# Altium schematic symbol library Capacitor.SchLib: 166 symbols
Pins are listed as number, name and electrical type; pins without a type are passive.

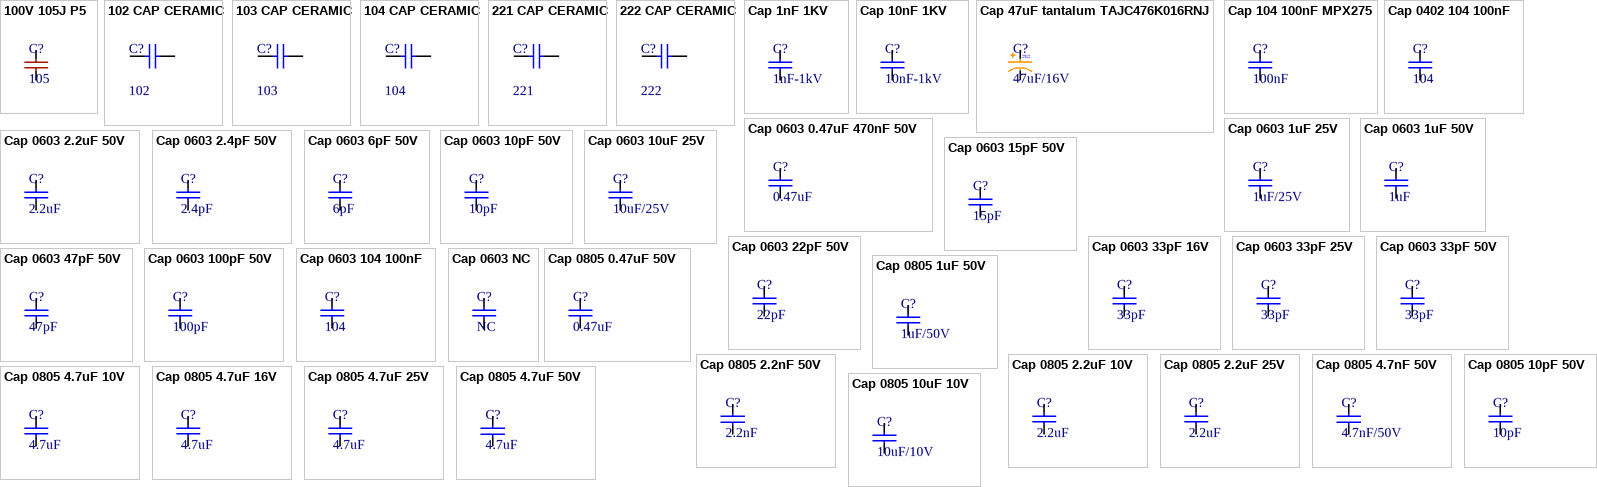
[diagram p0: symbols 100V 105J P5 to Cap 0805 10uF 10V]

## 100V 105J P5
designator C?, comment 105
105J 100V 1uF P5mm; Code: 1418-079
footprint CBB 100V 104J P5 (5mm)
footprint CBB P10 (10mm)
footprint CBB P7.5 (7.5mm)
pins: 1, 2

## 102 CAP CERAMIC
designator C?, comment 102
CAP CERAMIC 102 - 1nF; Code: 1416-022
footprint CAP_CERAMIC d2.54 (Tu gom mini)
footprint CAP_CERAMIC d3.81
pins: 1, 2

## 103 CAP CERAMIC
designator C?, comment 103
CAP CERAMIC 103 - 10nF; Code: 1416-023
footprint CAP_CERAMIC d2.54 (Tu gom mini)
footprint CAP_CERAMIC d3.81
pins: 1, 2

## 104 CAP CERAMIC
designator C?, comment 104
Cap CAP CERAMIC 104 - 100nF; Code: 1416-029
footprint CAP_CERAMIC d2.54 (Tu gom mini)
footprint CAP_CERAMIC d3.81
pins: 1, 2

## 221 CAP CERAMIC
designator C?, comment 221
221, 2.2pF 50V, ±10%; Code: 1416-018
footprint CAP_CERAMIC d2.54 (Tu gom mini)
footprint CAP_CERAMIC d3.81
pins: 1, 2

## 222 CAP CERAMIC
designator C?, comment 222
222, 22pF 50V, ±10%; Code: 1416-010
footprint CAP_CERAMIC d2.54 (Tu gom mini)
footprint CAP_CERAMIC d3.81
pins: 1, 2

## Cap 1nF 1KV
designator C?, comment 1nF-1kV
102 1KV High Voltage Ceramic Disk Capacitor; Code: N/A
footprint CAP_CERAMIC d5.08
pins: 1, 2

## Cap 10nF 1KV
designator C?, comment 10nF-1kV
103 1KV High Voltage Ceramic Disk Capacitor; Code: 1416-047
footprint CAP_CERAMIC d5.08
pins: 1, 2

## Cap 47uF tantalum TAJC476K016RNJ
designator C?, comment 47uF/16V
Cap SMD 2312 (6032); Code: N/A; Value: 47uF/16V
footprint C_tantalum_6032-2312 (CAPACITOR, TAN C, TAN F, TAN U, TAN L, 6032P, 6.0X3.2mm)
pins: 1, 2
text: 2312

## Cap 104 100nF MPX275
designator C?, comment 100nF
Cap 104 100nF 275V MPX275V X2, P = 10mm; Designed by: Nhox; Code: N/A
footprint MPX 275V (13x12x6mm)
pins: 1, 2

## Cap 0402 104 100nF
designator C?, comment 104
Cap SMD 0402 104-100nF-0.1uF 50V; Code: 1454-080
footprint C_0402_SMD
pins: 1, 2

## Cap 0603 0.47uF 470nF 50V
designator C?, comment 0.47uF
Cap SMD 0603; Code: 1451-087
footprint C_0603_SMD
pins: 1, 2

## Cap 0603 1uF 25V
designator C?, comment 1uF/25V
Cap SMD 0603 105 - 1uF 25V; Code: 1450-092
footprint C_0603_SMD
pins: 1, 2

## Cap 0603 1uF 50V
designator C?, comment 1uF
Cap SMD 0603; Code: 1451-092
footprint C_0603_SMD
pins: 1, 2

## Cap 0603 2.2uF 50V
designator C?, comment 2.2uF
Cap SMD 0603; Code: 1451-094
footprint C_0603_SMD
pins: 1, 2

## Cap 0603 2.4pF 50V
designator C?, comment 2.4pF
Cap SMD 0603 2.4pF 50V; Designed by: Nhox; Code: N/A
footprint C_0603_SMD
pins: 1, 2

## Cap 0603 6pF 50V
designator C?, comment 6pF
Cap SMD 0603 6pF 50V; Designed by: Nhox; Code: N/A
footprint C_0603_SMD
pins: 1, 2

## Cap 0603 10pF 50V
designator C?, comment 10pF
Cap SMD 0603; Code: 1451-018
footprint C_0603_SMD
pins: 1, 2

## Cap 0603 10uF 25V
designator C?, comment 10uF/25V
Cap SMD 0603 106-10uF 25V; Code: 1450-100
footprint C_0603_SMD
pins: 1, 2

## Cap 0603 15pF 50V
designator C?, comment 15pF
Cap SMD 0603 15pF 50V; Code: 1451-022
footprint C_0603_SMD
pins: 1, 2

## Cap 0603 22pF 50V
designator C?, comment 22pF
Cap SMD 0603; Code: 1451-024
footprint C_0603_SMD
pins: 1, 2

## Cap 0603 33pF 16V
designator C?, comment 33pF
Cap SMD 0603; Code: 1449-030
footprint C_0603_SMD
pins: 1, 2

## Cap 0603 33pF 25V
designator C?, comment 33pF
Cap SMD 0603; Code: 1450-030
footprint C_0603_SMD
pins: 1, 2

## Cap 0603 33pF 50V
designator C?, comment 33pF
Cap SMD 0603; Code: 1451-030
footprint C_0603_SMD
pins: 1, 2

## Cap 0603 47pF 50V
designator C?, comment 47pF
Cap SMD 0603; Code: 1451-034
footprint C_0603_SMD
pins: 1, 2

## Cap 0603 100pF 50V
designator C?, comment 100pF
Cap SMD 0603; Code: N/A
footprint C_0603_SMD
pins: 1, 2

## Cap 0603 104 100nF
designator C?, comment 104
Cap SMD 0603 104-100nF-0.1uF 50V; Code: 1451-080
footprint C_0603_SMD
pins: 1, 2

## Cap 0603 NC
designator C?, comment NC  (no BOM)
Cap SMD 0603 NC; Code: N/A
footprint C_0603_SMD
pins: 1, 2

## Cap 0805 0.47uF 50V
designator C?, comment 0.47uF
Cap SMD 0805 0.47uF/50V, 470nF/50V, 474; Code: N/A
footprint C_0805_SMD
pins: 1, 2

## Cap 0805 1uF 50V
designator C?, comment 1uF/50V
Cap SMD 0805 105 - 1uF 50V; Code: 1438-092
footprint C_0805_SMD
pins: 1, 2

## Cap 0805 2.2nF 50V
designator C?, comment 2.2nF
Tu 2.2nF 50V, SMD 0805; Code: 1438-062
footprint C_0805_SMD
pins: 1, 2

## Cap 0805 2.2uF 10V
designator C?, comment 2.2uF
Cap SMD 0805 225 - 2.2uF 10V; Code: 1434-094
footprint C_0805_SMD
pins: 1, 2

## Cap 0805 2.2uF 25V
designator C?, comment 2.2uF
Cap SMD 0805 2.2uF/25V; Code: 1436-094
footprint C_0805_SMD
pins: 1, 2

## Cap 0805 4.7nF 50V
designator C?, comment 4.7nF/50V
Capacitor SMD 0805; Code: 1438-065; Designed by: TranLuyen
footprint C_0805_SMD
pins: 1, 2

## Cap 0805 4.7uF 10V
designator C?, comment 4.7uF
Cap SMD 0805 475 - 4.7uF 10V; Code: 1434-097
footprint C_0805_SMD
pins: 1, 2

## Cap 0805 4.7uF 16V
designator C?, comment 4.7uF
Cap SMD 0805 4.7uF/16V; Code: 1435-097
footprint C_0805_SMD
pins: 1, 2

## Cap 0805 4.7uF 25V
designator C?, comment 4.7uF
Cap SMD 0805 475 - 4.7uF 25V; Code: 1434-097
footprint C_0805_SMD
pins: 1, 2

## Cap 0805 4.7uF 50V
designator C?, comment 4.7uF
Capacitor SMD 0805; Code: 1438-097; Designed by: TranLuyen
footprint C_0805_SMD
pins: 1, 2

## Cap 0805 10pF 50V
designator C?, comment 10pF
Cap SMD 0805; Code: 1438-018
footprint C_0805_SMD
pins: 1, 2

## Cap 0805 10uF 10V
designator C?, comment 10uF/10V
Tu Dan 10uF 10V, SMD 0805; Code: 1434-100; Designed by: nhox
footprint C_0805_SMD
pins: 1, 2

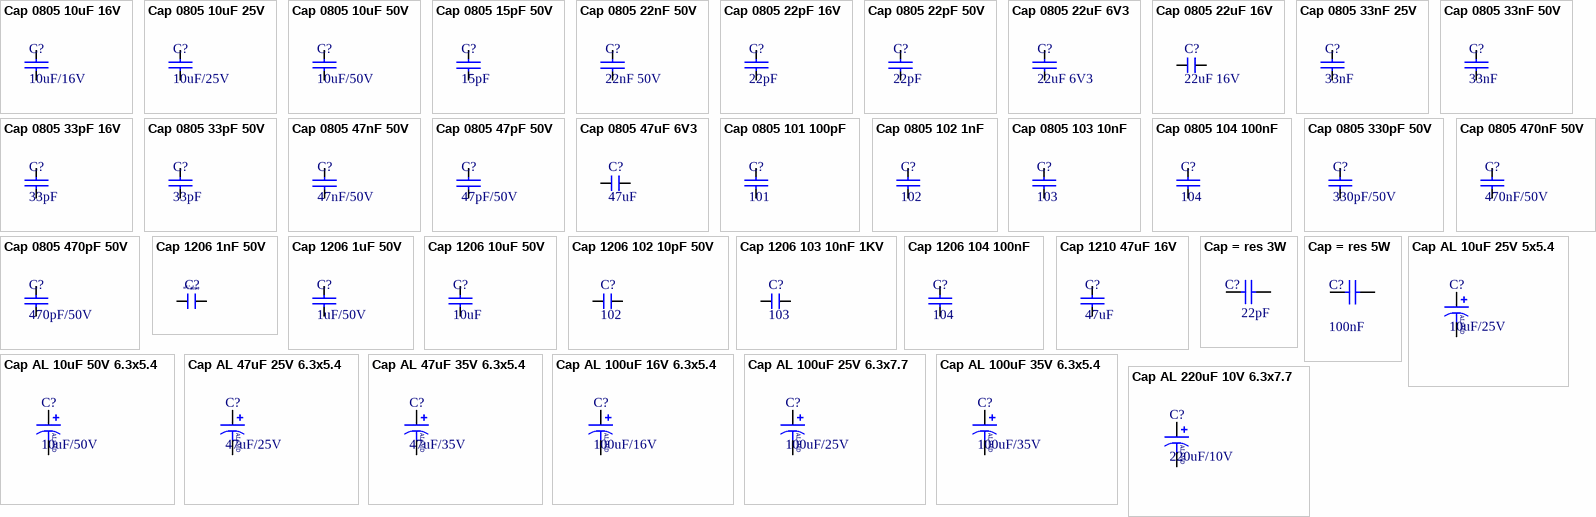
[diagram p1: symbols Cap 0805 10uF 16V to Cap AL 220uF 10V 6.3x7.7]

## Cap 0805 10uF 16V
designator C?, comment 10uF/16V
Cap SMD 0805 10uF 16V; Code: 1435-100
footprint C_0805_SMD
pins: 1, 2

## Cap 0805 10uF 25V
designator C?, comment 10uF/25V
Cap SMD 0805 10uF; Code: 1436-100
footprint C_0805_SMD
pins: 1, 2

## Cap 0805 10uF 50V
designator C?, comment 10uF/50V
Cap SMD 0805 10uF 50V; Code: 1438-100
footprint C_0805_SMD
pins: 1, 2

## Cap 0805 15pF 50V
designator C?, comment 15pF
Capacitor SMD 0805; Code: 1438-022; Designed by: TranLuyen
footprint C_0805_SMD
pins: 1, 2

## Cap 0805 22nF 50V
designator C?, comment 22nF 50V
Capacitor SMD 0805; Code: 1438-073
footprint C_0805_SMD
pins: 1, 2

## Cap 0805 22pF 16V
designator C?, comment 22pF
Cap SMD 0805; Code: 1435-024; Designed by: TranLuyen
footprint C_0805_SMD
pins: 1, 2

## Cap 0805 22pF 50V
designator C?, comment 22pF
Tu 22pF 50V, SMD 0805; Code: 1438-024; Designed by: nhox
footprint C_0805_SMD
pins: 1, 2

## Cap 0805 22uF 6V3
designator C?, comment 22uF 6V3
Tu Dan 22uF 6V3, SMD 0805; Code: 1431-208
footprint C_0805_SMD
pins: 1, 2

## Cap 0805 22uF 16V
designator C?, comment 22uF 16V
Tu Dan 22uF 16V, SMD 0805; Code: 1431-213; Designed by: Nhox
footprint C_0805_SMD
pins: 1, 2

## Cap 0805 33nF 25V
designator C?, comment 33nF
Cap SMD 0805 33nF/25V; Code: 1436-075
footprint C_0805_SMD
pins: 1, 2

## Cap 0805 33nF 50V
designator C?, comment 33nF
Cap SMD 0805; Code: 1438-075
footprint C_0805_SMD
pins: 1, 2

## Cap 0805 33pF 16V
designator C?, comment 33pF
Cap SMD 0805; Code: 1435-030; Designed by: Nhox
footprint C_0805_SMD
pins: 1, 2

## Cap 0805 33pF 50V
designator C?, comment 33pF
Cap SMD 0805; Code: 1438-030; Designed by: Nhox
footprint C_0805_SMD
pins: 1, 2

## Cap 0805 47nF 50V
designator C?, comment 47nF/50V
Capacitor SMD 0805; Code: 1438-076; Designed by: TranLuyen
footprint C_0805_SMD
pins: 1, 2

## Cap 0805 47pF 50V
designator C?, comment 47pF/50V
Capacitor SMD 0805; Code: 1438-034; Designed by: TranLuyen
footprint C_0805_SMD
pins: 1, 2

## Cap 0805 47uF 6V3
designator C?, comment 47uF
Tu Dan 47uF 6V3, SMD 0805; Code: 1431-200
footprint C_0805_SMD
pins: 1, 2

## Cap 0805 101 100pF
designator C?, comment 101
Cap SMD 0805 101-100pF 50V; Code: 1438-043
footprint C_0805_SMD
pins: 1, 2

## Cap 0805 102 1nF
designator C?, comment 102
Cap SMD 0805 102-1nF 50V; Code: 1438-060
footprint C_0805_SMD
pins: 1, 2

## Cap 0805 103 10nF
designator C?, comment 103
Cap SMD 0805 103-10nF 50V; Code: 1438-069
footprint C_0805_SMD
pins: 1, 2

## Cap 0805 104 100nF
designator C?, comment 104
Cap SMD 0805 104-100nF-0.1uF 50V; Code: 1438-080
footprint C_0805_SMD
pins: 1, 2

## Cap 0805 330pF 50V
designator C?, comment 330pF/50V
Cap SMD 0805  330pF 50V
footprint C_0805_SMD
pins: 1, 2

## Cap 0805 470nF 50V
designator C?, comment 470nF/50V
Cap SMD 0805  470nF 50V; Code: 1438-087
footprint C_0805_SMD
pins: 1, 2

## Cap 0805 470pF 50V
designator C?, comment 470pF/50V
Cap SMD 0805  470pF 50V; Code: 1438-056
footprint C_0805_SMD
pins: 1, 2

## Cap 1206 1nF 50V
designator C?, comment 1nF/50V  (value not drawn)
Cap SMD 1206; Code: 1447-060; Designed by: nhox
footprint C1206 (CHIP Capacitor, 3.2X1.6mm, 1206)
pins: 1, 2

## Cap 1206 1uF 50V
designator C?, comment 1uF/50V
Cap SMD 1206; Code: 1447-092
footprint C1206 (CHIP Capacitor, 3.2X1.6mm, 1206)
pins: 1, 2

## Cap 1206 10uF 50V
designator C?, comment 10uF
Cap SMD 1206 105-10uF 50V; Code: N/A
footprint C1206 (CHIP Capacitor, 3.2X1.6mm, 1206)
pins: 1, 2

## Cap 1206 102 10pF 50V
designator C?, comment 102
Tu 10pF 50V, SMD 1206; Code: 1447-018; Designed by: Nhox
footprint C1206 (CHIP Capacitor, 3.2X1.6mm, 1206)
pins: 1, 2

## Cap 1206 103 10nF 1KV
designator C?, comment 103
Tu 10nF 1KV, SMD 1206; Code: 1429-103; Designed by: Nhox
footprint C1206 (CHIP Capacitor, 3.2X1.6mm, 1206)
pins: 1, 2

## Cap 1206 104 100nF
designator C?, comment 104
Cap SMD 1206 104-100nF-0.1uF 50V; Code: 1447-080
footprint C1206 (CHIP Capacitor, 3.2X1.6mm, 1206)
pins: 1, 2

## Cap 1210 47uF 16V
designator C?, comment 47uF
Cap SMD 1210 (3215M); Designed by: TranLuyen; Code: N/A
footprint C1210 (CHIP Capacitor, 3.2X2.5mm, 1210, 3225)
pins: 1, 2

## Cap = res 3W
designator C?, comment value 22pF  (hidden comment: Capacitor Ceramic)
Capacitor; Published: 8-Jun-2000; LatestRevisionDate: 17-Jul-2002; LatestRevisionNote: Re-released for DXP Platform.; PackageReference: RAD-0.3; Publisher: Altium Limited
footprint Cap = res 3W (R2W, 2 pin, 700mil)
pins: 1, 2

## Cap = res 5W
designator C?, comment 100nF
Capacitor
footprint Cap res 5W (Tu loc 220)
pins: 1, 2

## Cap AL 10uF 25V 5x5.4
designator C?, comment 10uF/25V
Aluminum Capacitor 35V; Designed by: TranLuyen; Code: 1457-216
footprint C_EL_5 (Electrolytic Cap, D: 5.0mm, L: 5.8mm, Size C)
pins: 1, 2
1 alternate drawing of the same symbol
text: ALSMD

## Cap AL 10uF 50V 6.3x5.4
designator C?, comment 10uF/50V
Aluminum Capacitor SMD; Code: 1458-216; Designed by: TranLuyen
footprint C_EL_6_6 (Electrolytic Cap, D: 6.3mm L: 5.8mm, Size D)
pins: 1, 2
1 alternate drawing of the same symbol
text: ALSMD

## Cap AL 47uF 25V 6.3x5.4
designator C?, comment 47uF/25V
Aluminum Capacitor SMD 47uF 25V 6.3x5.4mm; Designed by: TranLuyen; Code: 1457-219
footprint C_EL_6_6 (Electrolytic Cap, D: 6.3mm L: 5.8mm, Size D)
pins: 1, 2
1 alternate drawing of the same symbol
text: ALSMD

## Cap AL 47uF 35V 6.3x5.4
designator C?, comment 47uF/35V
Aluminum Capacitor 35V; Code: 1458-103; Designed by: TranLuyen
footprint C_EL_6_6 (Electrolytic Cap, D: 6.3mm L: 5.8mm, Size D)
pins: 1, 2
1 alternate drawing of the same symbol
text: ALSMD

## Cap AL 100uF 16V 6.3x5.4
designator C?, comment 100uF/16V
Aluminum Capacitor D6.3 L5.4; Designed by: TranLuyen; Code: 1457-106
footprint C_EL_6_6 (Electrolytic Cap, D: 6.3mm L: 5.8mm, Size D)
pins: 1, 2
1 alternate drawing of the same symbol
text: ALSMD

## Cap AL 100uF 25V 6.3x7.7
designator C?, comment 100uF/25V
Aluminum Capacitor D6.3 L7.7; Designed by: TranLuyen; Code: 1457-222
footprint C_EL_6_6 (Electrolytic Cap, D: 6.3mm L: 5.8mm, Size D)
pins: 1, 2
1 alternate drawing of the same symbol
text: ALSMD

## Cap AL 100uF 35V 6.3x5.4
designator C?, comment 100uF/35V
Aluminum Capacitor 35V; Code: 1458-106; Designed by: TranLuyen
footprint C_EL_6_6 (Electrolytic Cap, D: 6.3mm L: 5.8mm, Size D)
footprint C_EL_8 (Electrolytic Cap, Size E, Size F, 8.3X10)
pins: 1, 2
1 alternate drawing of the same symbol
text: ALSMD

## Cap AL 220uF 10V 6.3x7.7
designator C?, comment 220uF/10V
Aluminum Capacitor D6.3 L7.7
footprint C_EL_6_6 (Electrolytic Cap, D: 6.3mm L: 5.8mm, Size D)
pins: 1, 2
1 alternate drawing of the same symbol
text: ALSMD

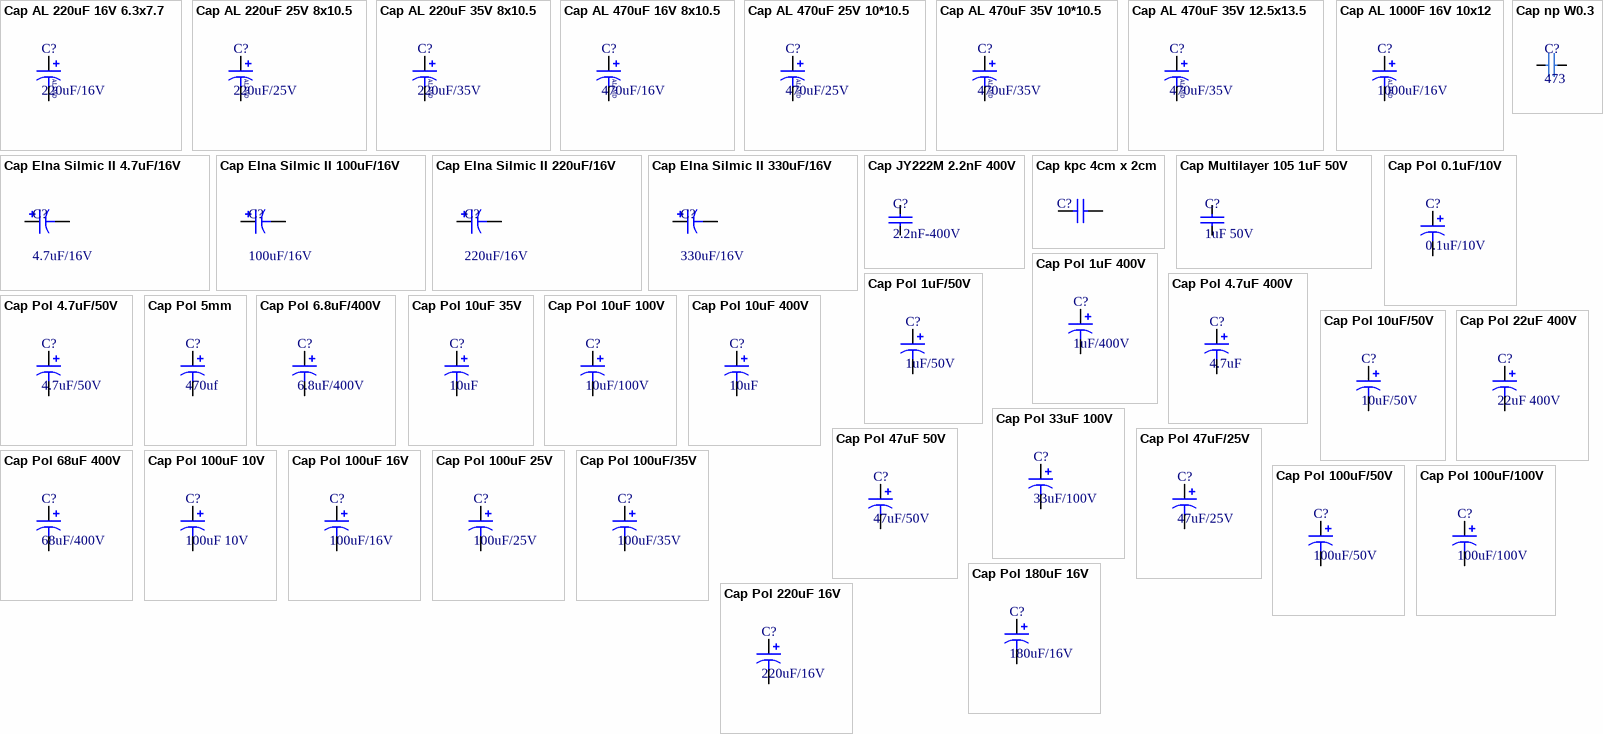
[diagram p2: symbols Cap AL 220uF 16V 6.3x7.7 to Cap Pol 220uF 16V]

## Cap AL 220uF 16V 6.3x7.7
designator C?, comment 220uF/16V
Aluminum Capacitor D6.3 L7.7; Designed by: TranLuyen; Code: 1457-109
footprint C_EL_6_6 (Electrolytic Cap, D: 6.3mm L: 5.8mm, Size D)
pins: 1, 2
1 alternate drawing of the same symbol
text: ALSMD

## Cap AL 220uF 25V 8x10.5
designator C?, comment 220uF/25V
Aluminum Capacitor 220uF 25V; Code: 1457-225
footprint C_EL_8 (Electrolytic Cap, Size E, Size F, 8.3X10)
pins: 1, 2
1 alternate drawing of the same symbol
text: ALSMD

## Cap AL 220uF 35V 8x10.5
designator C?, comment 220uF/35V
Aluminum Capacitor D8*L10.5; Code: 1458-109
footprint C_EL_8 (Electrolytic Cap, Size E, Size F, 8.3X10)
pins: 1, 2
1 alternate drawing of the same symbol
text: ALSMD

## Cap AL 470uF 16V 8x10.5
designator C?, comment 470uF/16V
Aluminum Capacitor 470uF D8 L10.5; Code: 1457-112
footprint C_EL_8 (Electrolytic Cap, Size E, Size F, 8.3X10)
pins: 1, 2
1 alternate drawing of the same symbol
text: ALSMD

## Cap AL 470uF 25V 10*10.5
designator C?, comment 470uF/25V
Aluminum Capacitor 470uF D10 L10.5; Code: 1457-228
footprint C_EL_10_12 (Electrolytic Cap, 10.3mm, L: 12.4mm)
pins: 1, 2
1 alternate drawing of the same symbol
text: ALSMD

## Cap AL 470uF 35V 10*10.5
designator C?, comment 470uF/35V
Aluminum Capacitor 470uF D10 L10.5
footprint C_EL_10_12 (Electrolytic Cap, 10.3mm, L: 12.4mm)
pins: 1, 2
1 alternate drawing of the same symbol
text: ALSMD

## Cap AL 470uF 35V 12.5x13.5
designator C?, comment 470uF/35V
Aluminum Capacitor 470uF D12.5 L13.5- / UCZ1V471M; Code: 1458-112; Designed by: TranLuyen
footprint C_EL_12 (Electrolytic Cap, 12.5x13mm)
pins: 1, 2
1 alternate drawing of the same symbol
text: ALSMD

## Cap AL 1000F 16V 10x12
designator C?, comment 1000uF/16V
Aluminum Capacitor 1000uF D10 L12; Code: 1457-114; Designed by: TranLuyen
footprint C_EL_10_12 (Electrolytic Cap, 10.3mm, L: 12.4mm)
pins: 1, 2
1 alternate drawing of the same symbol
text: ALSMD

## Cap Elna Silmic II 4.7uF/16V
designator C?, comment 4.7uF/16V
Cap Elna Silmic II 4.7uF/16V audio; Code: N/A
footprint C_4X7 (Cap Elec, D4.0X7.0H pitch: 1.5mm)
pins: 1, 2
1 alternate drawing of the same symbol

## Cap Elna Silmic II 100uF/16V
designator C?, comment 100uF/16V
Cap Elna Silmic II 100uF/16V audio; Code: N/A
footprint C_8X12 (Cap Elec, D8.0X12.0H pitch: 3.5mm, RB.14/.26, RB.15/.32)
pins: 1, 2
1 alternate drawing of the same symbol

## Cap Elna Silmic II 220uF/16V
designator C?, comment 220uF/16V
Cap Elna Silmic II 220uF/16V audio; Code: N/A
footprint C_8X12 (Cap Elec, D8.0X12.0H pitch: 3.5mm, RB.14/.26, RB.15/.32)
pins: 1, 2
1 alternate drawing of the same symbol

## Cap Elna Silmic II 330uF/16V
designator C?, comment 330uF/16V
Cap Elna Silmic II 330uF/16V audio; Code: N/A
footprint C_10X20 (Cap Elec, D10.0X20.0H pitch: 5.0mm, RB.2/.4)
pins: 1, 2
1 alternate drawing of the same symbol

## Cap JY222M 2.2nF 400V
designator C?, comment 2.2nF-400V
2.2nF 400V High Voltage Ceramic Disk Capacitor; Code: 1416-048
footprint CAP_CERAMIC d5.08
pins: 1, 2

## Cap kpc 4cm x 2cm
designator C?, comment Capacitor Ceramic  (value not drawn)
Capacitor
footprint Cap kpc 4cm x 2cm (Cap)
pins: 1, 2

## Cap Multilayer 105 1uF 50V
designator C?, comment 1uF 50V
1uF ±10% 50V, code 105; Code: 1425-001; Designed by: Nhox
footprint CN2-T
pins: 1, 2

## Cap np W0.3
designator C?, comment 473
Cap np W0.3; Value: 0.047uF; Code: N/A
footprint CN3
pins: 1, 2

## Cap Pol 0.1uF/10V
designator C?, comment 0.1uF/10V
Polarized Capacitor (Axial); Code: 1401-199
footprint C3MM
pins: 1, 2
1 alternate drawing of the same symbol

## Cap Pol 1uF 400V
designator C?, comment 1uF/400V
Polarized Capacitor (Axial); Code: 1404-330
footprint C_6.3x12 (pitch 2.5mm)
pins: 1, 2
1 alternate drawing of the same symbol

## Cap Pol 1uF/50V
designator C?, comment 1uF/50V
Polarized Capacitor (Axial); Code: 1402-330; Value: 1uF/50V
footprint C3MM
pins: 1, 2
1 alternate drawing of the same symbol

## Cap Pol 4.7uF 400V
designator C?, comment 4.7uF
Polarized Capacitor (Axial); Code: 1404-335
footprint C_8X12 (Cap Elec, D8.0X12.0H pitch: 3.5mm, RB.14/.26, RB.15/.32)
pins: 1, 2
1 alternate drawing of the same symbol

## Cap Pol 4.7uF/50V
designator C?, comment 4.7uF/50V
Polarized Capacitor (Axial) 4.7uF/50V; Code: 1402-335
footprint C5mm
pins: 1, 2
1 alternate drawing of the same symbol

## Cap Pol 5mm
designator C?, comment 470uf
Polarized Capacitor (Axial)
footprint C5mm
footprint C5mm - NAM
pins: 1, 2
1 alternate drawing of the same symbol

## Cap Pol 6.8uF/400V
designator C?, comment 6.8uF/400V
Polarized Capacitor (Axial); Code: N/A
footprint C10mm
pins: 1, 2
1 alternate drawing of the same symbol

## Cap Pol 10uF 35V
designator C?, comment 10uF
Polarized Capacitor (Axial); Code: 1402-219
footprint C_8X12 (Cap Elec, D8.0X12.0H pitch: 3.5mm, RB.14/.26, RB.15/.32)
pins: 1, 2
1 alternate drawing of the same symbol

## Cap Pol 10uF 100V
designator C?, comment 10uF/100V
Polarized Capacitor (Axial); Code: 1403-219
footprint C_6.3x12 (pitch 2.5mm)
pins: 1, 2
1 alternate drawing of the same symbol

## Cap Pol 10uF 400V
designator C?, comment 10uF
Polarized Capacitor (Axial); Code: 1404-338
footprint C_10X16 (Cap Elec, D10.0X16.0H pitch: 5.0mm)
pins: 1, 2
1 alternate drawing of the same symbol

## Cap Pol 10uF/50V
designator C?, comment 10uF/50V
Polarized Capacitor (Axial) 10uF/50V; Code: 1402-338
footprint C5mm
pins: 1, 2
1 alternate drawing of the same symbol

## Cap Pol 22uF 400V
designator C?, comment 22uF 400V
Capacitor 22uF 400V DxL 12.5x20mm, Pin to Pin 5mm; Code: N/A
footprint CAP 5.0*12.5*20 - BK (½Å¾à5mmÖ±¾¶12.5mm¸ß¶È20mm)
pins: 1, 2
1 alternate drawing of the same symbol

## Cap Pol 33uF 100V
designator C?, comment 33uF/100V
Capacitor 33uF 100V, 8x12mm DIP; Code: 1403-221
footprint C8X12mm (Cap Elec, D8.0X12.0H pitch: 3.5mm, RB.14/.26, RB.15/.32)
footprint C_8x12_R (8x12)
pins: 1, 2
1 alternate drawing of the same symbol

## Cap Pol 47uF 50V
designator C?, comment 47uF/50V
Polarized Capacitor; Code: 1402-341
footprint C_6.3x15 (pitch 2.5mm)
pins: 1, 2
1 alternate drawing of the same symbol

## Cap Pol 47uF/25V
designator C?, comment 47uF/25V
Polarized Capacitor (Axial) 47uF 25V; Code: 1402-103
footprint C5mm
pins: 1, 2
1 alternate drawing of the same symbol

## Cap Pol 68uF 400V
designator C?, comment 68uF/400V
Capacitor pol; Code: 1404-343
footprint C_16x27 (7.5MM Lead Spacing)
pins: 1, 2
1 alternate drawing of the same symbol

## Cap Pol 100uF 10V
designator C?, comment 100uF 10V
Polarized Capacitor (Axial) 100uF 10V; Code: 1401-225
footprint C_6.3x7 (pitch 2.5mm)
pins: 1, 2
1 alternate drawing of the same symbol

## Cap Pol 100uF 16V
designator C?, comment 100uF/16V
Polarized Capacitor (Axial); Code: 1401-344
footprint C_6.3x12 (pitch 2.5mm)
pins: 1, 2
1 alternate drawing of the same symbol

## Cap Pol 100uF 25V
designator C?, comment 100uF/25V
Polarized Capacitor (Axial); Code: 1402-106
footprint C_6.3x12 (pitch 2.5mm)
pins: 1, 2
1 alternate drawing of the same symbol

## Cap Pol 100uF/35V
designator C?, comment 100uF/35V
Polarized Capacitor (Axial) 100uF 35V; Code: 1402-225
footprint C_6.3x12 (pitch 2.5mm)
pins: 1, 2
1 alternate drawing of the same symbol

## Cap Pol 100uF/50V
designator C?, comment 100uF/50V
Polarized Capacitor (Axial) 100uF 50V; Code: N/A
footprint C_8X12 (Cap Elec, D8.0X12.0H pitch: 3.5mm, RB.14/.26, RB.15/.32)
footprint C_8x12_R (8x12)
pins: 1, 2
1 alternate drawing of the same symbol

## Cap Pol 100uF/100V
designator C?, comment 100uF/100V
Polarized Capacitor (Axial) 100uF 100V; Code: 1403-225
footprint C_10X16 (Cap Elec, D10.0X16.0H pitch: 5.0mm)
pins: 1, 2
1 alternate drawing of the same symbol

## Cap Pol 180uF 16V
designator C?, comment 180uF/16V
Capacitor 180uF 10V, 5x8mm DIP; Code: N/A
footprint C5mm
pins: 1, 2
1 alternate drawing of the same symbol

## Cap Pol 220uF 16V
designator C?, comment 220uF/16V
Capacitor 220uF 16V; Code: 1401-347
footprint C_6.3x7 (pitch 2.5mm)
pins: 1, 2
1 alternate drawing of the same symbol

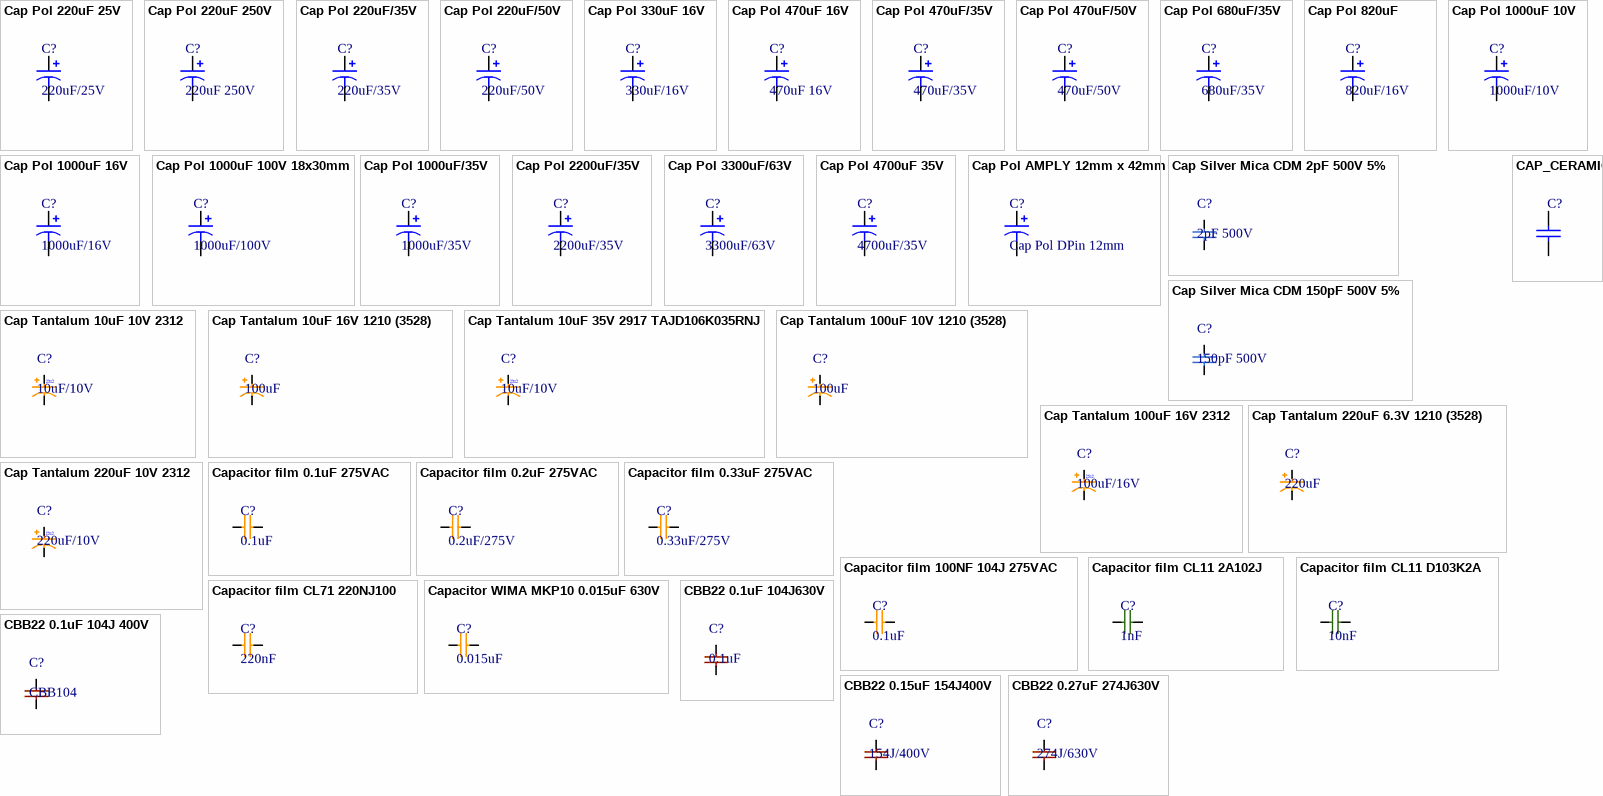
[diagram p3: symbols Cap Pol 220uF 25V to CBB22 0.27uF 274J630V]

## Cap Pol 220uF 25V
designator C?, comment 220uF/25V
Capacitor 220uF 25V; Code: 1402-109
footprint C8X12mm (Cap Elec, D8.0X12.0H pitch: 3.5mm, RB.14/.26, RB.15/.32)
pins: 1, 2
1 alternate drawing of the same symbol

## Cap Pol 220uF 250V
designator C?, comment 220uF 250V
Capacitor 220uF 250V DxL 18x35mm, Pin to Pin 7.5mm; Code: N/A
footprint CAP 7.5*18*35.5 - BK (Pin to Pin 7.5mm. DxL 18x35.5mm)
pins: 1, 2
1 alternate drawing of the same symbol

## Cap Pol 220uF/35V
designator C?, comment 220uF/35V
Polarized Capacitor (Axial) 220uF 35V; Code: 1402-228
footprint C5mm
footprint C8X12mm (Cap Elec, D8.0X12.0H pitch: 3.5mm, RB.14/.26, RB.15/.32)
pins: 1, 2
1 alternate drawing of the same symbol

## Cap Pol 220uF/50V
designator C?, comment 220uF/50V
Polarized Capacitor (Axial) 220uF 50V; Code: 1402-347
footprint C_10X16 (Cap Elec, D10.0X16.0H pitch: 5.0mm)
pins: 1, 2
1 alternate drawing of the same symbol

## Cap Pol 330uF 16V
designator C?, comment 330uF/16V
Capacitor 330uF 16; Code: 1401-349
footprint C8X12mm (Cap Elec, D8.0X12.0H pitch: 3.5mm, RB.14/.26, RB.15/.32)
pins: 1, 2
1 alternate drawing of the same symbol

## Cap Pol 470uF 16V
designator C?, comment 470uF 16V
Code: 1401-350
footprint C8X12mm (Cap Elec, D8.0X12.0H pitch: 3.5mm, RB.14/.26, RB.15/.32)
pins: 1, 2
1 alternate drawing of the same symbol

## Cap Pol 470uF/35V
designator C?, comment 470uF/35V
Polarized Capacitor (Axial) 470uF 35V; Code: 1402-231
footprint C10mm
footprint C8X12mm (Cap Elec, D8.0X12.0H pitch: 3.5mm, RB.14/.26, RB.15/.32)
pins: 1, 2
1 alternate drawing of the same symbol

## Cap Pol 470uF/50V
designator C?, comment 470uF/50V
CAP POL; Code: 1402-350
footprint C_10X20 (Cap Elec, D10.0X20.0H pitch: 5.0mm, RB.2/.4)
pins: 1, 2
1 alternate drawing of the same symbol

## Cap Pol 680uF/35V
designator C?, comment 680uF/35V
Polarized Capacitor (Axial) 680uF 35V; Code: 1402-232
footprint C10mm
footprint C8X12mm (Cap Elec, D8.0X12.0H pitch: 3.5mm, RB.14/.26, RB.15/.32)
pins: 1, 2
1 alternate drawing of the same symbol

## Cap Pol 820uF
designator C?, comment 820uF/16V
Capacitor 820uF 16V; Code: N/A
footprint C_10X16 (Cap Elec, D10.0X16.0H pitch: 5.0mm)
pins: 1, 2
1 alternate drawing of the same symbol

## Cap Pol 1000uF 10V
designator C?, comment 1000uF/10V
Capacitor 1000uF 10V, 8x12mm DIP; Code: N/A
footprint C8X12mm (Cap Elec, D8.0X12.0H pitch: 3.5mm, RB.14/.26, RB.15/.32)
footprint C_8x12_R (8x12)
pins: 1, 2
1 alternate drawing of the same symbol

## Cap Pol 1000uF 16V
designator C?, comment 1000uF/16V
Capacitor pol; Code: 1401-352
footprint C_8X12 (Cap Elec, D8.0X12.0H pitch: 3.5mm, RB.14/.26, RB.15/.32)
pins: 1, 2
1 alternate drawing of the same symbol

## Cap Pol 1000uF 100V 18x30mm
designator C?, comment 1000uF/100V
Polarized Capacitor (Axial) 1000uF/100V; Code: 1403-233
footprint C_18X35_2 (Cap Elec, D18X35H pitch: 7.6mm, 5mm, RB.3/.7)
pins: 1, 2
1 alternate drawing of the same symbol

## Cap Pol 1000uF/35V
designator C?, comment 1000uF/35V
Polarized Capacitor (Axial) 1000uF 35V; Code: 1402-233
footprint C_10X20 (Cap Elec, D10.0X20.0H pitch: 5.0mm, RB.2/.4)
footprint C_12.5x22 (5MM Lead Spacing)
pins: 1, 2
1 alternate drawing of the same symbol

## Cap Pol 2200uF/35V
designator C?, comment 2200uF/35V
Polarized Capacitor (Axial) 2200uF 35V; Code: 1402-234
footprint C_16x27 (7.5MM Lead Spacing)
pins: 1, 2
1 alternate drawing of the same symbol

## Cap Pol 3300uF/63V
designator C?, comment 3300uF/63V
Polarized Capacitor (Axial) 3300uF/63V; Code: 1403-116
footprint C_18X35 (Cap Elec, D18X35H pitch: 7.6mm, RB.3/.7)
pins: 1, 2
1 alternate drawing of the same symbol

## Cap Pol 4700uF 35V
designator C?, comment 4700uF/35V
Cap pol; Code: 1402-236
footprint C_18X35 (Cap Elec, D18X35H pitch: 7.6mm, RB.3/.7)
pins: 1, 2
1 alternate drawing of the same symbol

## Cap Pol AMPLY 12mm x 42mm
designator C?, comment Cap Pol DPin 12mm
Polarized Capacitor (Axial)
footprint Cap tu hoa amply (cap 12mm D42mm)
pins: 1, 2
1 alternate drawing of the same symbol

## Cap Silver Mica CDM 2pF 500V 5%
designator C?, comment 2pF 500V
2pF 500V 5% Cap Silver Mica CDM (5.9m); Code: N/A
footprint Silver Mica CDM 5.9mm
pins: 1, 2

## Cap Silver Mica CDM 150pF 500V 5%
designator C?, comment 150pF 500V
150pF 500V 5% Cap Silver Mica CDM (5.9m); Code: N/A
footprint Silver Mica CDM 5.9mm
pins: 1, 2

## Cap Tantalum 10uF 10V 2312
designator C?, comment 10uF/10V
Cap SMD 2312 (6032); Code: 1419-038; Value: 10uF/10V
footprint C_tantalum_6032-2312 (CAPACITOR, TAN C, TAN F, TAN U, TAN L, 6032P, 6.0X3.2mm)
pins: 1, 2
text: 2312

## Cap Tantalum 10uF 16V 1210 (3528)
designator C?, comment 100uF
Cap Tantalum SMD 1210 (3528)
footprint C_TANTALUM_3528_1210 (3.5 x 2.8 x 2.1mm)
pins: 1, 2

## Cap Tantalum 10uF 35V 2917 TAJD106K035RNJ
designator C?, comment 10uF/10V
Cap SMD 2312 (6032); Code: 1419-038; Value: 10uF/10V
footprint C_tantalum_2917_TAJD106K035RNJ (Conventional MnO2,10 uF,35 V)
pins: 1, 2
text: 2312

## Cap Tantalum 100uF 10V 1210 (3528)
designator C?, comment 100uF
Cap Tantalum SMD 1210 (3528); Code: 1419-039; Designed by: TranLuyen
footprint C_TANTALUM_3528_1210 (3.5 x 2.8 x 2.1mm)
pins: 1, 2

## Cap Tantalum 100uF 16V 2312
designator C?, comment 100uF/16V
Cap SMD 2312 (6032); Code: N/A
footprint C_tantalum_6032-2312 (CAPACITOR, TAN C, TAN F, TAN U, TAN L, 6032P, 6.0X3.2mm)
pins: 1, 2
text: 2312

## Cap Tantalum 220uF 6.3V 1210 (3528)
designator C?, comment 220uF
Cap Tantalum SMD 1210 (3528), 220uF, 6.3V; Designed by: Nhox; Code: N/A
footprint C_TANTALUM_3528_1210 (3.5 x 2.8 x 2.1mm)
pins: 1, 2

## Cap Tantalum 220uF 10V 2312
designator C?, comment 220uF/10V
Cap SMD 2312 (6032); Code: N/A
footprint C_tantalum_6032-2312 (CAPACITOR, TAN C, TAN F, TAN U, TAN L, 6032P, 6.0X3.2mm)
pins: 1, 2
text: 2312

## CAP_CERAMIC
designator C?, comment Capacitor Ceramic  (value not drawn)
102 103 104; Published: 8-Jun-2000; LatestRevisionDate: 17-Jul-2002; LatestRevisionNote: Re-released for DXP Platform.; PackageReference: RAD-0.3; Publisher: Altium Limited
footprint CAP_CERAMIC d2.54 (Tu gom mini)
footprint CAP_CERAMIC d3.81
footprint CAP_CERAMIC d5.08
pins: 1, 2

## Capacitor film 0.1uF 275VAC
designator C?, comment 0.1uF
Polyester Film Capacitor MPX series MPX104K275VAC 0.1uF 275V; Code: 1417-046; Designed by: Nhox
footprint C polyester film MPX104K275VAC 10mm/15mm (tu keo vang 0.1uF 275V)
pins: 1, 2

## Capacitor film 0.2uF 275VAC
designator C?, comment 0.2uF/275V
Polyester Film Capacitor MPX series MPX204K275VAC 0.2uF 275V; Designed by: TranLuyen; Code: N/A
footprint C polyester film MPX104K275VAC (tu keo vang 0.1uF 275V)
footprint C polyester film MPX104K275VAC 10mm/15mm (tu keo vang 0.1uF 275V)
pins: 1, 2

## Capacitor film 0.33uF 275VAC
designator C?, comment 0.33uF/275V
Polyester Film Capacitor MPX series MPX334K275VAC  0.33uF 275V; Designed by: TranLuyen; Code: N/A
footprint C polyester film MPX 0.33uF 275VAC (tu keo vang 0.33uF 275V)
footprint C polyester film MPX104K275VAC 10mm/15mm (tu keo vang 0.1uF 275V)
pins: 1, 2

## Capacitor film 100NF 104J 275VAC
designator C?, comment 0.1uF
Polyester Film Capacitor MPX series MPX104K275VAC 100nF 0.1uF 275V; Code: 1417-045; Designed by: TranLuyen
footprint C polyester film MPX104K275VAC (tu keo vang 0.1uF 275V)
footprint C polyester film MPX104K275VAC 10mm/15mm (tu keo vang 0.1uF 275V)
pins: 1, 2

## Capacitor film CL11 2A102J
designator C?, comment 1nF
CL11 Polyester Film capacitor-Inductive-PEI. 100V; Code: 1417-008; Designed by: TranLuyen
footprint C polyester film CL11 - 4mm (tu keo xanh)
pins: 1, 2

## Capacitor film CL11 D103K2A
designator C?, comment 10nF
CL11 Polyester Film capacitor-Inductive-PEI. 100V; Designed by: TranLuyen; Code: N/A
footprint C polyester film CL11 - 4mm (tu keo xanh)
pins: 1, 2

## Capacitor film CL71 220NJ100
designator C?, comment 220nF
224J 100V CL71 0.22uF 100V 10%, size: 7x2.5mm, polyester film; Code: 1417-039; Designed by: TranLuyen
footprint C polyester film CL71 - 5mm (tu keo vang)
pins: 1, 2

## Capacitor WIMA MKP10 0.015uF 630V
designator C?, comment 0.015uF
Capacitor WIMA MKP10 0.015uF 630V; Code: N/A
footprint C WIMA MKP10 0.015 630V (WIMA MKP10 0.015 630V)
pins: 1, 2

## CBB22 0.1uF 104J630V
designator C?, comment 0.1uF
CBB22 Polyester Capacitor; Designed by: TranLuyen; Code: N/A
footprint CBB22-20mm-10mm
pins: 1, 2

## CBB22 0.1uF 104J 400V
designator C?, comment CBB104
CBB22 Polyester Capacitor; Code: N/A
footprint CBB22-20mm-10mm
pins: 1, 2

## CBB22 0.15uF 154J400V
designator C?, comment 154J/400V
CBB22 Polyester Capacitor; Designed by: TranLuyen; Code: N/A
footprint CBB 10-15mm (15*18*11mm)
pins: 1, 2

## CBB22 0.27uF 274J630V
designator C?, comment 274J/630V
CBB22 Polyester Capacitor; Code: N/A
footprint CBB22-20mm-10mm
pins: 1, 2

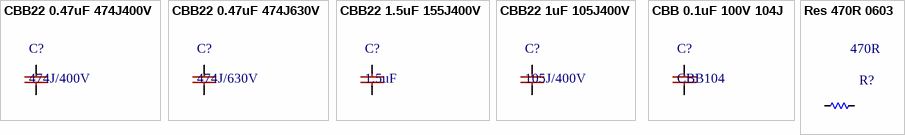
[diagram p4: symbols CBB22 0.47uF 474J400V to Res 470R 0603]

## CBB22 0.47uF 474J400V
designator C?, comment 474J/400V
CBB22 Polyester Capacitor; Code: N/A
footprint CBB 10-15mm (15*18*11mm)
pins: 1, 2

## CBB22 0.47uF 474J630V
designator C?, comment 474J/630V
CBB22 Polyester Capacitor; Code: N/A
footprint CBB22-20mm-10mm
pins: 1, 2

## CBB22 1.5uF 155J400V
designator C?, comment 1.5uF
CBB22 Polyester Capacitor; Designed by: TranLuyen; Code: N/A
footprint CBB 155J 400V
pins: 1, 2

## CBB22 1uF 105J400V
designator C?, comment 105J/400V
CBB22 Polyester Capacitor; Designed by: TranLuyen; Code: N/A
footprint CBB22-20mm-10mm
pins: 1, 2

## CBB 0.1uF 100V 104J
designator C?, comment CBB104
CBB22 Polyester Capacitor; Code: 1418-100
footprint CBB 100V 104J P5 (5mm)
footprint CBB P10 (10mm)
footprint CBB P7.5 (7.5mm)
pins: 1, 2

## Res 470R 0603
designator R?, comment 470R
Resistor SMD 0603; Code: 1028-078
footprint RES-SMD-0603
pins: 1, 2